# Altium footprint library DIM.PcbLib: 183 footprints (part 10 of 12)
Each footprint in its own frame and in the unit in brackets; x right, y up, seen from the top. Pads: shape width x height; smd on the part's side, far side on the other; paste and mask are expansions set on the pad; w line width, h text height; cw(c..) or ccw(c..) is an arc to the next point about the centre after c.
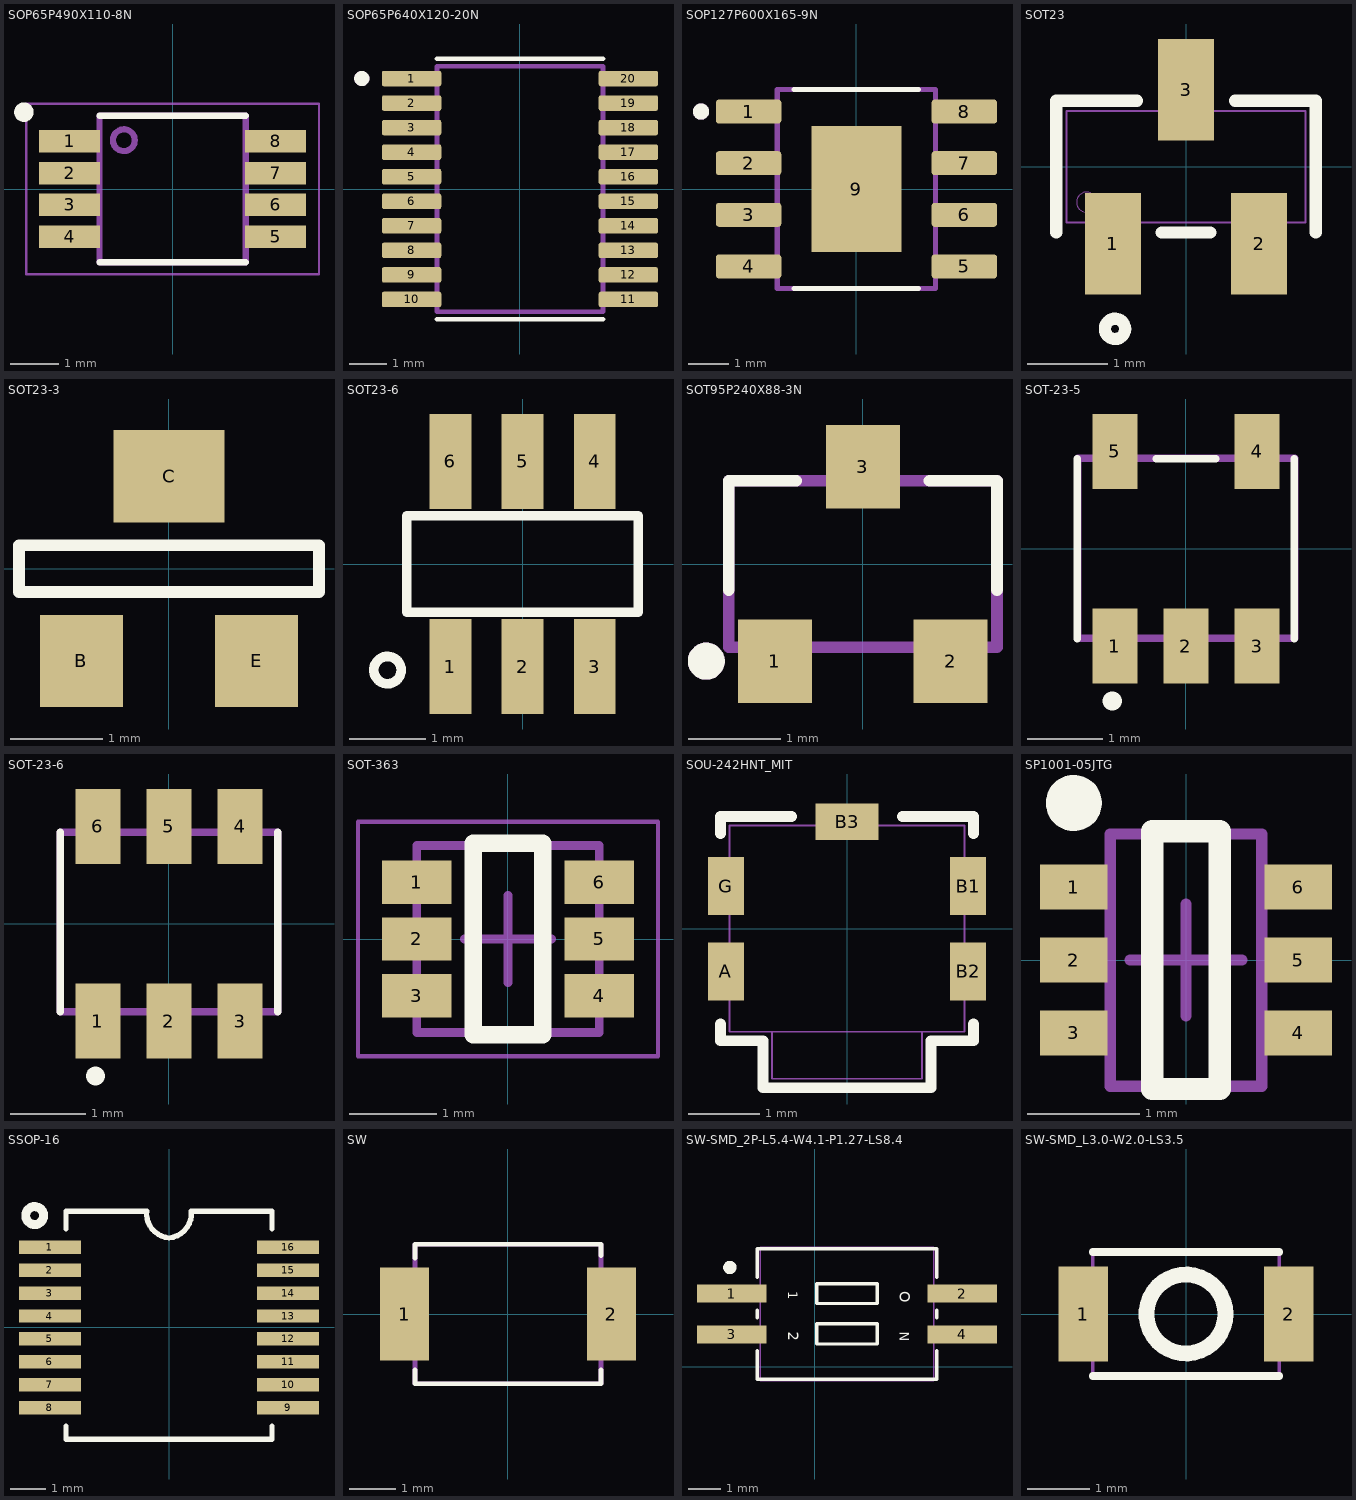
[diagram p9: the footprints below, top view; thin cyan lines are the x and y axes]

## SOP65P490X110-8N [mm]
pads (8):
  rect 1.25x0.46 smd: 1(-2.11,0.975) 2(-2.11,0.325) 3(-2.11,-0.325) 4(-2.11,-0.975) 5(2.11,-0.975) 6(2.11,-0.325) 7(2.11,0.325) 8(2.11,0.975)
Top Overlay:
  circle w0.2: c-3.05,1.575 r0.1
  lines w0.127: -1.5,-1.5 1.5,-1.5 ; -1.5,1.5 1.5,1.5
Mechanical 13:
  circle w0.127: c-1,1 r0.224
  lines w0.127: -1.5,-1.5 1.5,-1.5 1.5,1.5 -1.5,1.5 -1.5,-1.5
Mechanical 15:
  lines w0.05: -3,-1.75 3,-1.75 3,1.75 -3,1.75 -3,-1.75
3D body "step_temp.STEP": height 1.1, standoff 0, extent -2.45,-1.5 2.45,1.5

## SOP65P640X120-20N [mm]
pads (20):
  rrect25% 1.57x0.41 smd mask+0.05: 1(-2.87,2.925) 2(-2.87,2.275) 3(-2.87,1.625) 4(-2.87,0.975) 5(-2.87,0.325) 6(-2.87,-0.325) 7(-2.87,-0.975) 8(-2.87,-1.625) 9(-2.87,-2.275) 10(-2.87,-2.925) 11(2.87,-2.925) 12(2.87,-2.275) 13(2.87,-1.625) 14(2.87,-0.975) 15(2.87,-0.325) 16(2.87,0.325) 17(2.87,0.975) 18(2.87,1.625) 19(2.87,2.275) 20(2.87,2.925)
Top Overlay:
  circle w0.2: c-4.19,2.925 r0.1
  lines w0.127: -2.2,-3.45 2.2,-3.45 ; -2.2,3.45 2.2,3.45
Mechanical 13:
  circle w0.2: c-4.19,2.925 r0.1
  lines w0.127: -2.2,-3.25 -2.2,3.25 2.2,3.25 2.2,-3.25 -2.2,-3.25
3D body "step_temp.STEP": height 1.2, standoff 0, extent -3.2,-3.25 3.2,3.25

## SOP127P600X165-9N [mm]
height 1.65
pads (9):
  rrect25% 1.61x0.59 smd: 1(-2.655,1.905) 2(-2.655,0.635) 3(-2.655,-0.635) 4(-2.655,-1.905) 5(2.655,-1.905) 6(2.655,-0.635) 7(2.655,0.635) 8(2.655,1.905)
  rect 2.21x3.1 smd paste-3: 9(0,0)
Top Overlay:
  circle w0.2: c-3.825,1.905 r0.1
  lines w0.127: -1.53,-2.45 1.53,-2.45 ; -1.53,2.45 1.53,2.45
Top Paste:
  region: 0.699,-0.98 -0.699,-0.98 -0.699,0.98 0.699,0.98
Mechanical 13:
  circle w0.2: c-3.825,1.905 r0.1
  lines w0.127: -1.95,-2.45 1.95,-2.45 1.95,2.45 -1.95,2.45 -1.95,-2.45
3D body "step_temp.STEP": height 1.65, standoff 0, extent -3,-2.45 3,2.45

## SOT23 [mm]
pads (3):
  rect 0.7x1.27 smd paste+0 mask+0.102: 1(-0.915,-0.965) 2(0.915,-0.965) 3(0,0.965)
Top Overlay:
  circle w0.152: c-0.889,-2.032 r0.127
  lines w0.152: -1.626,-0.826 -1.626,0.826 -0.612,0.826 ; -0.303,-0.826 0.303,-0.826 ; 0.612,0.826 1.626,0.826 1.626,-0.826
Mechanical 13:
  circle w0: c-1.245,-0.445 r0.127
  lines w0.025: -1.499,-0.699 1.499,-0.699 1.499,0.699 -1.499,0.699 -1.499,-0.699 ; -1.169,-1.245 -1.169,-0.699 -0.661,-0.699 -0.661,-1.245 -1.169,-1.245 ; -0.254,0.699 0.254,0.699 0.254,1.245 -0.254,1.245 -0.254,0.699 ; 0.661,-1.245 0.661,-0.699 1.169,-0.699 1.169,-1.245 0.661,-1.245
3D body "SOT23_DIO.step": height 1.09, standoff 0, extent -1.499,-1.245 1.499,1.245

## SOT23-3 [mm]
pads (3):
  rect 0.9x1 smd: B(-0.95,-1) E(0.95,-1)
  rect 1.2x1 smd: C(0,1)
Top Overlay:
  lines w0.127: -1.626,-0.254 1.626,-0.254 1.626,0.254 -1.626,0.254 -1.626,-0.254
3D body: height 1, standoff 0, extent -1.651,-0.508 1.651,0.508

## SOT23-6 [mm]
pads (6):
  rect 0.55x1.25 smd: 1(-0.95,-1.35) 2(0,-1.35) 3(0.95,-1.35) 4(0.95,1.35) 5(0,1.35) 6(-0.95,1.35)
Top Overlay:
  circle w0.127: c-1.778,-1.397 r0.18
  lines w0.127: -1.524,-0.635 1.524,-0.635 1.524,0.635 -1.524,0.635 -1.524,-0.635
3D body: height 1.45, standoff 0, extent -1.524,-0.635 1.524,0.635

## SOT95P240X88-3N [mm]
height 0.88
pads (3):
  rect 0.8x0.9 smd: 1(-0.95,-1.05) 2(0.95,-1.05) 3(0,1.05)
Top Overlay:
  circle w0.2: c-1.692,-1.05 r0.1
  lines w0.127: -1.45,-0.28 -1.45,0.9 -0.72,0.9 ; 0.72,0.9 1.45,0.9 1.45,-0.28
Mechanical 13:
  circle w0.2: c-1.692,-1.05 r0.1
  lines w0.127: -1.45,-0.9 -1.45,0.9 1.45,0.9 1.45,-0.9 -1.45,-0.9
3D body "step_temp.STEP": height 0.88, standoff 0, extent -1.4,-1.2 1.4,1.2

## SOT-23-5 [mm]
pads (5):
  rect 0.6x1 smd: 1(-0.95,-1.3) 2(0,-1.3) 3(0.95,-1.3) 4(0.95,1.3) 5(-0.95,1.3)
Top Overlay:
  lines w0.1: -1.45,-1.2 -1.45,1.2 ; -0.4,1.2 0.4,1.2 ; 1.448,-1.2 1.448,1.2
  lines w0.254: -0.985,-2.035 cw(c-0.9,-2.1) -0.982,-2.031
Mechanical 13:
  lines w0.1: -1.448,-1.194 1.452,-1.194 1.452,1.206 -1.448,1.206 -1.448,-1.194
3D body "SOT-23-5.stp": height 1, standoff 0, extent -1.449,-1.194 1.451,1.206

## SOT-23-6 [mm]
pads (6):
  rect 0.6x1 smd: 1(-0.95,-1.3) 2(0,-1.3) 3(0.95,-1.3) 4(0.95,1.3) 5(0,1.3) 6(-0.95,1.3)
Top Overlay:
  lines w0.1: -1.45,-1.176 -1.45,1.224 ; 1.45,-1.176 1.45,1.224
  lines w0.254: -0.985,-2.035 cw(c-0.9,-2.1) -0.982,-2.031
Mechanical 13:
  lines w0.1: -1.45,-1.176 1.45,-1.176 1.45,1.224 -1.45,1.224 -1.45,-1.176
3D body "SOT-23-6.stp": height 1, standoff 0, extent -1.45,-1.176 1.45,1.224

## SOT-363 [mm]
pads (6):
  rect 0.8x0.5 smd: 1(-1.05,0.65) 2(-1.05,0) 3(-1.05,-0.65) 4(1.05,-0.65) 5(1.05,0) 6(1.05,0.65)
Top Overlay:
  lines w0.2: -0.4,-1.1 0.4,-1.1 0.4,1.1 -0.4,1.1 -0.4,-1.1
Mechanical 13:
  lines w0.1: -1.05,-1.075 -1.05,1.075 1.05,1.075 1.05,-1.075 -1.05,-1.075
Mechanical 15:
  lines w0.05: -1.725,-1.35 -1.725,1.35 1.725,1.35 1.725,-1.35 -1.725,-1.35
  lines w0.1: -0.5,0 0.5,0 ; 0,-0.5 0,0.5
3D body: height 1, standoff 0.05, extent -1.05,-1.075 1.05,1.075

## SOU-242HNT_MIT [mil]
pads (5):
  rect 20x32 smd: A(-66.95,-23.6) B1(66.95,23.6) B2(66.95,-23.6) G(-66.95,23.6)
  rect 35x20 smd: B3(0,59.1)
Top Overlay:
  lines w6: -70,-52.7 -70,-62 -46.5,-62 -46.5,-88 46.5,-88 46.5,-62 70,-62 70,-52.7 ; -70,52.7 -70,62 -30.6,62 ; 30.6,62 70,62 70,52.7
Mechanical 13:
  lines w1: -41.5,-57 -41.5,-83 41.5,-83 41.5,-57 ; -65,-57 -65,57 65,57 65,-57 -65,-57
3D body: height 39.37, standoff 0, extent -47,-88 47,-44.86
3D body: height 39.37, standoff 0, extent -70.4,-57 70,62

## SP1001-05JTG [mm] "SOT23, 6-Leads, Body 2.05x2.20mm, Pitch 0.65mm, IPC Medium Density"
height 1.1
pads (6):
  rect 0.6x0.4 smd mask+0.07: 1(-1,0.65) 2(-1,0) 3(-1,-0.65) 4(1,-0.65) 5(1,0) 6(1,0.65)
Top Overlay:
  circle w0.25: c-1,1.4 r0.125
  lines w0.2: -0.3,-1.15 -0.3,1.15 0.3,1.15 0.3,-1.15 -0.3,-1.15
Mechanical 13:
  lines w0.1: -0.675,-1.125 0.675,-1.125 0.675,1.125 -0.675,1.125 -0.675,-1.125
Mechanical 15:
  lines w0.1: -0.5,0 0.5,0 ; 0,-0.5 0,0.5
3D body: height 1.1, standoff 0.05, extent -0.675,-1.125 0.675,1.125

## SSOP-16 [mil]
pads (16):
  rect 69x15 smd: 1(-133,89.57) 2(-133,63.98) 3(-133,38.39) 4(-133,12.8) 5(-133,-12.8) 6(-133,-38.39) 7(-133,-63.98) 8(-133,-89.57) 9(133,-89.57) 10(133,-63.98) 11(133,-38.39) 12(133,-12.8) 13(133,12.8) 14(133,38.39) 15(133,63.98) 16(133,89.57)
Top Overlay:
  circle w10: c-150,125 r10
  lines w5.98: -25,130 ccw(c2.5,127.5) 0,100 ccw(c-2.5,127.5) 25,130
  lines w6: -115,-110.17 -115,-125 115,-125 115,-110.17 ; -115,110.17 -115,130 -25,130 ; 25,130 115,130 115,110.17
3D body: height 78.74, standoff 0, extent -115,-127.5 115,127.5

## SW [mm]
pads (2):
  rect 1.05x2 smd: 1(-2.225,0) 2(2.225,0)
Top Overlay:
  lines w0.1: -2,-1.2 -2,-1.5 1.9,-1.5 2,-1.5 2,-1.2 ; -2,1.2 -2,1.5 1.7,1.5 2,1.5 2,1.25
Mechanical 13:
  lines w0.1: -2,-1.5 -2,1.5 2,1.5 2,-1.5 -2,-1.5
3D body: height 1.55, standoff 0, extent -2,-1.5 2,1.5

## SW-SMD_2P-L5.4-W4.1-P1.27-LS8.4 [mm]
pads (4):
  rect 2.158x0.56 smd: 1(-2.594,2.285) 2(4.594,2.285) 3(-2.594,1.015) 4(4.594,1.015)
Top Overlay:
  circle w0.207: c-2.65,3.1 r0.104
  lines w0.1: -1.794,0.504 -1.794,-0.382 3.794,-0.382 3.794,0.504 ; -1.794,1.526 -1.794,1.774 ; -1.794,2.796 -1.794,3.682 3.794,3.682 3.794,2.796 ; 3.794,1.526 3.794,1.774 ; 0.06,0.711 1.94,0.711 1.94,1.346 0.06,1.346 0.06,0.711 ; 0.06,1.981 1.94,1.981 1.94,2.591 0.06,2.591 0.06,1.981
  text "O" at 2.646,2.362 h0.33
  text "N" at 2.646,1.092 h0.3
  text "1" at -0.834,2.362 h0.3
  text "2" at -0.834,1.092 h0.33
Mechanical 13:
  lines w0.051: -1.7,-0.42 -1.7,3.72 3.7,3.72 3.7,-0.42 -1.7,-0.42
Mechanical 15:
  region: 4.355,2.085 3.69,2.085 3.69,2.485 4.355,2.485
  region: 5.175,2.085 4.345,2.085 4.345,2.485 5.175,2.485
  region: 4.355,0.815 3.69,0.815 3.69,1.215 4.355,1.215
  region: 5.175,0.815 4.345,0.815 4.345,1.215 5.175,1.215
  region: -2.355,0.815 -1.69,0.815 -1.69,1.215 -2.355,1.215
  region: -3.175,0.815 -2.345,0.815 -2.345,1.215 -3.175,1.215
  region: -2.355,2.085 -1.69,2.085 -1.69,2.485 -2.355,2.485
  region: -3.175,2.085 -2.345,2.085 -2.345,2.485 -3.175,2.485
3D body: height 2.3, standoff 0, extent -1.7,-0.42 3.7,3.72

## SW-SMD_L3.0-W2.0-LS3.5 [mm]
pads (2):
  rect 0.8x1.524 smd: 1(-1.65,0) 2(1.65,0)
Top Overlay:
  circle w0.254: c-0.001,0 r0.635
  lines w0.127: -1.501,-1 1.499,-1 ; -1.501,1 1.499,1
Mechanical 13:
  lines w0.051: -1.5,-1 1.5,-1 1.5,1 -1.5,1 -1.5,-1
3D body: height 0.5, standoff 0, extent -1.5,-1 1.5,1